# Altium footprint library PcbLib.PcbLib: 162 footprints (part 1 of 11)
Each footprint in its own frame and in the unit in brackets; x right, y up, seen from the top. Pads: shape width x height; smd on the part's side, far side on the other; paste and mask are expansions set on the pad; w line width, h text height; cw(c..) or ccw(c..) is an arc to the next point about the centre after c.
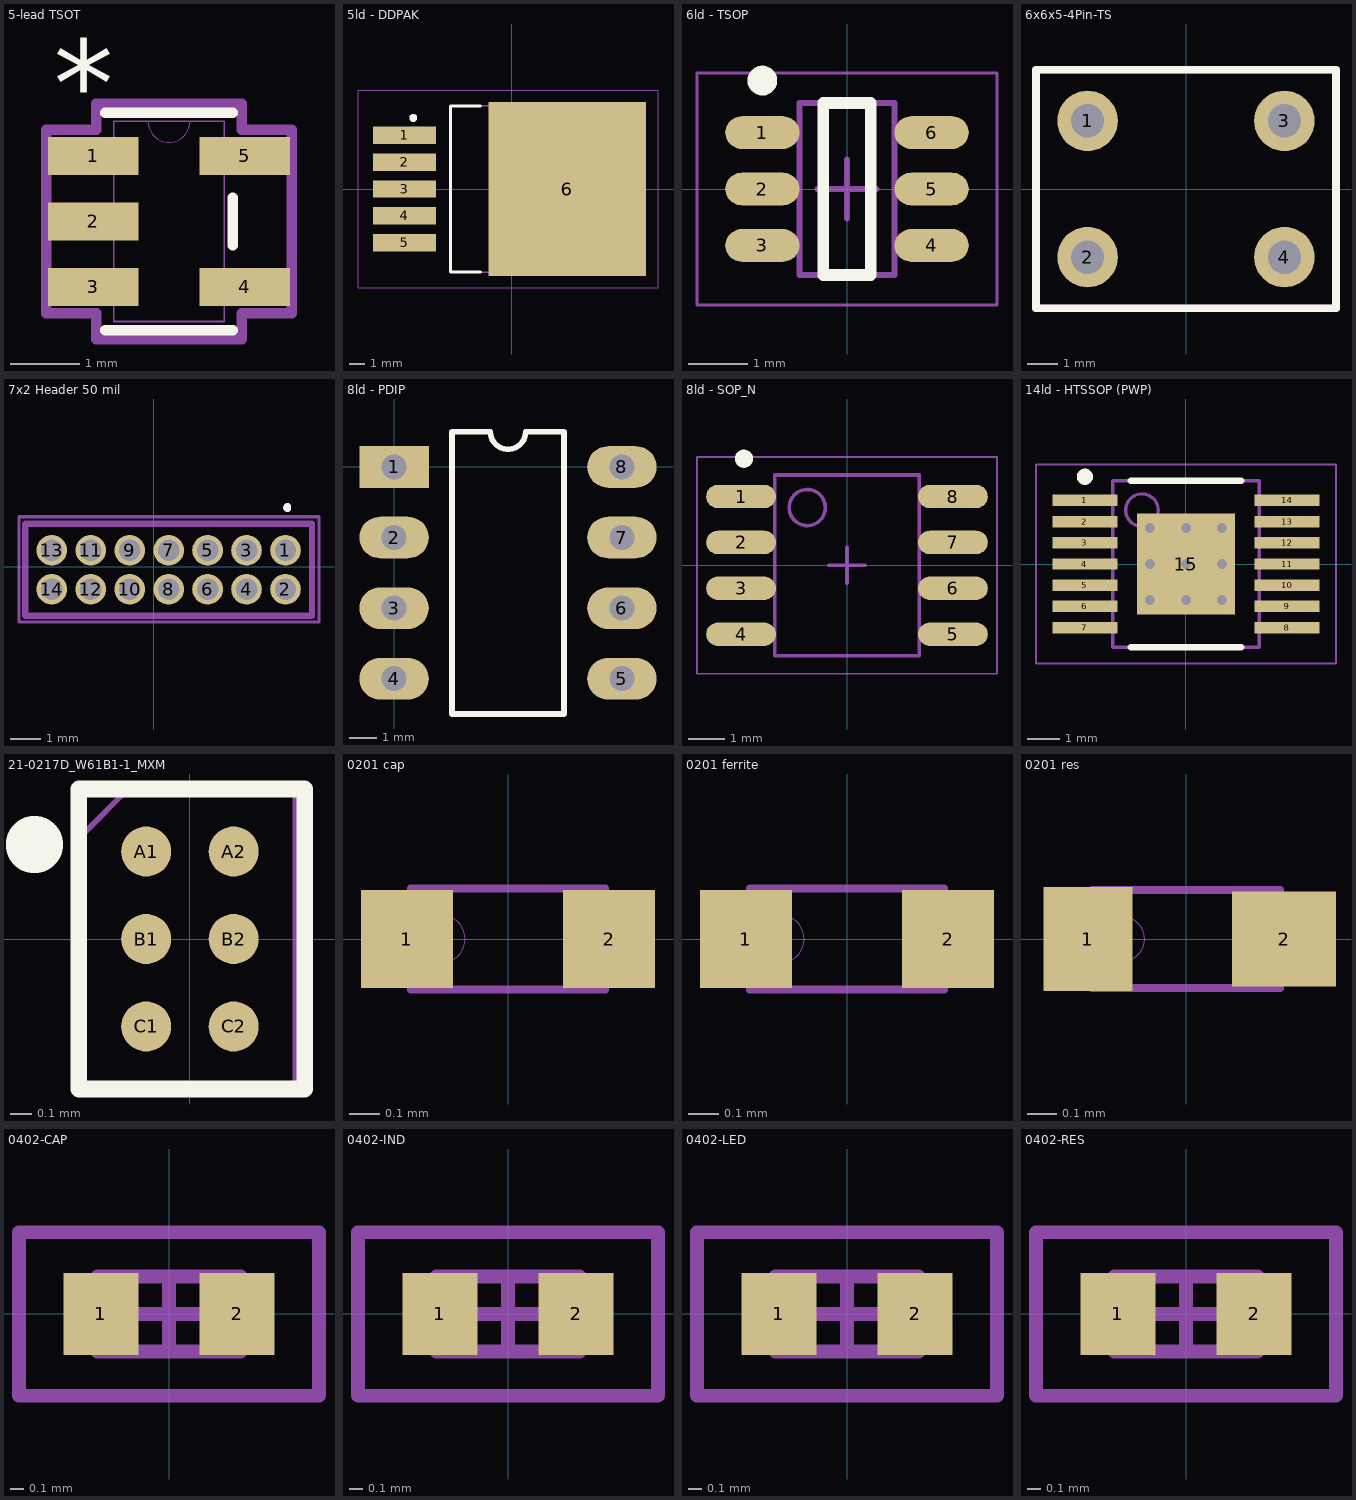
[diagram p0: the footprints below, top view; thin cyan lines are the x and y axes]

## 5-lead TSOT [mm] "LDO ADJ"
pads (5):
  rect 1.311x0.551 smd paste+0 mask+0: 1(2.71,-98.872) 2(2.71,-99.822) 3(2.71,-100.772) 4(4.91,-100.772) 5(4.91,-98.872)
Top Overlay:
  lines w0.152: 2.883,-101.399 4.737,-101.399 ; 2.883,-98.245 4.737,-98.245 ; 4.737,-100.164 4.737,-99.48
  text "*" at 2.138,-98.448 h1.27
Mechanical 13:
  lines w0: 3.505,-98.372 ccw(c3.81,-98.372) 4.115,-98.372
  lines w0.025: 2.41,-101.022 3.01,-101.022 3.01,-100.522 2.41,-100.522 2.41,-101.022 ; 2.41,-100.072 3.01,-100.072 3.01,-99.572 2.41,-99.572 2.41,-100.072 ; 2.41,-99.122 3.01,-99.122 3.01,-98.622 2.41,-98.622 2.41,-99.122 ; 3.01,-101.272 3.01,-98.372 4.61,-98.372 4.61,-101.272 3.01,-101.272 ; 4.61,-101.022 5.21,-101.022 5.21,-100.522 4.61,-100.522 4.61,-101.022 ; 4.61,-99.122 5.21,-99.122 5.21,-98.622 4.61,-98.622 4.61,-99.122
  text "*" at 2.946,-99.413 h1.27
Mechanical 15:
  lines w0.152: 2.029,-101.153 2.029,-98.491 2.756,-98.491 2.756,-98.118 4.864,-98.118 4.864,-98.491 5.591,-98.491 5.591,-101.153 4.864,-101.153 4.864,-101.526 2.756,-101.526 2.756,-101.153 2.029,-101.153
3D body "UJ_5.step": height 1, standoff 0, extent 2.41,-101.272 5.21,-98.372
3D body: height 0.25, standoff 0, extent 3.81,-99.822 4.064,-99.568

## 5ld - DDPAK [mm] "D2-PAK, 6-Pads, Body 7.80x8.63mm (max), IPC Low Density"
height 4.58
pads (6):
  rect 4x1.1 smd: 1(-6.8,3.4) 2(-6.8,1.7) 3(-6.8,0) 4(-6.8,-1.7) 5(-6.8,-3.4)
  rect 10x11 smd: 6(3.5,0)
Top Overlay:
  circle w0.25: c-6.25,4.5 r0.125
  lines w0.2: -2,-5.25 -3.9,-5.25 -3.9,5.25 -2,5.25
Mechanical 13:
  lines w0.1: -3.9,-5.275 -3.9,5.275 5.5,5.275 5.5,-5.275 -3.9,-5.275
Mechanical 15:
  lines w0.05: -9.75,-6.25 -9.75,6.25 9.25,6.25 9.25,-6.25 -9.75,-6.25
  lines w0.1: -0.5,0 0.5,0 ; 0,-0.5 0,0.5
3D body "User Library-LTC DD-PAK.STEP": height 4.48, standoff 0, extent -7.232,-5.112 7.119,5.112

## 6ld - TSOP [mm] "TSOP, 6-Leads, Body 2.90x1.60mm, Pitch 0.95mm, IPC Low Density"
height 1
pads (6):
  oval 1.25x0.55 smd: 1(-1.425,0.95) 2(-1.425,0) 3(-1.425,-0.95) 4(1.425,-0.95) 5(1.425,0) 6(1.425,0.95)
Top Overlay:
  circle w0.25: c-1.425,1.825 r0.125
  lines w0.2: -0.4,-1.45 0.4,-1.45 0.4,1.45 -0.4,1.45 -0.4,-1.45
Mechanical 13:
  lines w0.1: -0.8,-1.45 0.8,-1.45 0.8,1.45 -0.8,1.45 -0.8,-1.45
Mechanical 15:
  lines w0.05: -2.525,-1.95 2.525,-1.95 2.525,1.95 -2.525,1.95 -2.525,-1.95
  lines w0.1: -0.5,0 0.5,0 ; 0,-0.5 0,0.5
3D body "6ld - TSOP.step": height 1, standoff 0, extent -1.4,-1.45 1.4,1.45

## 6x6x5-4Pin-TS [mm] "6mm x 6mm x 5mm, 4-Pin, On Board, Tactile Switch"
height 5
pads (4):
  round 2 hole 1.1: 1(-3.25,2.25) 2(-3.25,-2.25) 3(3.25,2.25) 4(3.25,-2.25)
Top Overlay:
  lines w0.254: -4.953,-3.937 -4.953,3.937 4.953,3.937 4.953,-3.937 -4.953,-3.937
Mechanical 29:
  lines w0.254: -4.953,-3.937 4.953,-3.937 4.953,3.937 -4.953,3.937 -4.953,-3.937
3D body "User Library-Tactile switch 6x6x5mm.STEP": height 5.01, standoff -3.51, extent -3.871,-3.015 3.872,3.015

## 7x2 Header 50 mil [mm]
pads (14):
  round 1 hole 0.7: 1(4.293,0.533) 2(4.293,-0.737) 3(3.023,0.533) 4(3.023,-0.737) 5(1.753,0.533) 6(1.753,-0.737) 7(0.483,0.533) 8(0.483,-0.737) 9(-0.787,0.533) 10(-0.787,-0.737) 11(-2.057,0.533) 12(-2.057,-0.737) 13(-3.327,0.533) 14(-3.327,-0.737)
Top Overlay:
  lines w0.2: 4.369,1.876 cw(c4.369,1.926) 4.369,1.976 ; 4.369,1.876 cw(c4.369,1.926) 4.369,1.976 ; 4.369,1.876 4.369,1.976
Mechanical 13:
  lines w0.2: -4.192,-1.602 -4.192,1.398 5.158,1.398 5.158,-1.602 -4.192,-1.602
Mechanical 15:
  lines w0.1: -4.394,-1.803 -4.394,1.626 5.385,1.626 5.385,-1.803 -4.394,-1.803
3D body "HPH2-A-14-UA.STEP": height 3.81, standoff -2.49, extent -3.937,-1.824 4.953,1.626

## 8ld - PDIP [mm] "8-Lead Plastic Dual In-Line Package, Narrow Body"
height 5
pads (8):
  rect 2.5x1.5 hole 0.9: 1(0,0)
  oval 2.5x1.5 hole 0.9: 2(0,-2.54) 3(0,-5.08) 4(0,-7.62) 5(8.2,-7.62) 6(8.2,-5.08) 7(8.2,-2.54) 8(8.2,0)
Top Overlay:
  lines w0.2: 2.085,-8.89 2.085,1.27 3.465,1.27 ccw(c4.1,1.27) 4.735,1.27 6.115,1.27 6.115,-8.89 2.085,-8.89
3D body "User Library-DIP8test.STEP": height 4.57, standoff -3.81, extent 0.281,-8.765 8.101,1.145

## 8ld - SOP_N [mm] "SOP, 8-Leads, Body 4.90x3.90mm, Pitch 1.27mm, IPC Low Density"
height 1.75
pads (8):
  oval 1.929x0.65 smd: 1(-2.932,1.905) 2(-2.932,0.635) 3(-2.932,-0.635) 4(-2.932,-1.905) 5(2.932,-1.905) 6(2.932,-0.635) 7(2.932,0.635) 8(2.932,1.905)
Top Overlay:
  circle w0.25: c-2.85,2.95 r0.125
Mechanical 13:
  circle w0.1: c-1.1,1.6 r0.5
  lines w0.1: -2,-2.5 -2,2.5 2,2.5 2,-2.5 -2,-2.5
Mechanical 15:
  lines w0.05: -4.15,-3 -4.15,3 4.15,3 4.15,-3 -4.15,-3
  lines w0.1: -0.5,0 0.5,0 ; 0,-0.5 0,0.5
3D body "User Library-SOIC_N-R8.STEP": height 1.75, standoff 0, extent -3.1,-2.5 3.1,2.5

## 14ld - HTSSOP (PWP) [mm] "SSOP, 14-Leads, Body 5.00x4.40mm, Pitch 0.65mm, Thermal Pad 3.10.2x3.00.2mm, IPC Low Density"
height 1.2
pads (15):
  rect 2x0.35 smd: 1(-3.1,1.95) 2(-3.1,1.3) 3(-3.1,0.65) 4(-3.1,0) 5(-3.1,-0.65) 6(-3.1,-1.3) 7(-3.1,-1.95) 8(3.1,-1.95) 9(3.1,-1.3) 10(3.1,-0.65) 11(3.1,0) 12(3.1,0.65) 13(3.1,1.3) 14(3.1,1.95)
  rect 3x3.1 smd: 15(0,0)
via 1.1,-1.1 diameter 0.65 hole 0.3
via 0,-1.1 diameter 0.65 hole 0.3
via -1.1,-1.1 diameter 0.65 hole 0.3
via 1.1,0 diameter 0.65 hole 0.3
via 0,0 diameter 0.65 hole 0.3
via -1.1,0 diameter 0.65 hole 0.3
via 1.1,1.1 diameter 0.65 hole 0.3
via -1.1,1.1 diameter 0.65 hole 0.3
via 0,1.1 diameter 0.65 hole 0.3
Top Overlay:
  circle w0.25: c-3.1,2.675 r0.125
  lines w0.2: -1.7,-2.55 1.7,-2.55 ; -1.7,2.55 1.7,2.55
Mechanical 13:
  circle w0.1: c-1.35,1.65 r0.5
  lines w0.1: -2.25,-2.55 2.25,-2.55 2.25,2.55 -2.25,2.55 -2.25,-2.55
Mechanical 15:
  lines w0.05: -4.6,-3.05 4.6,-3.05 4.6,3.05 -4.6,3.05 -4.6,-3.05
  lines w0.1: -0.5,0 0.5,0 ; 0,-0.5 0,0.5
3D body "User Library-SSOP14P-P065.STEP": height 1.73, standoff -0.08, extent -3,-2.46 3,2.54

## 21-0217D_W61B1-1_MXM [mil]
pads (6):
  round 9 smd paste+0 mask+2: A1(-7.87,15.75) A2(7.87,15.75) B1(-7.87,0) B2(7.87,0) C1(-7.87,-15.75) C2(7.87,-15.75)
Top Overlay:
  circle w9.84: c-28,17 r0.23
  lines w3: -20,-27 20.69,-27 20.69,27 -20,27 -20,-27
Mechanical 13:
  lines w1: -19,19.13 -11.13,27 ; -19,-27 -19,27 19,27 19,-27 -19,-27
3D body "21-0217D_W61B1-1_MXM.step": height 27.09, standoff -0.01, extent -19.02,-27.01 19.02,27.01

## 0201 cap [mm]
pads (2):
  rect 0.3x0.32 smd mask+0.076: 1(-0.33,0) 2(0.33,0)
Mechanical 13:
  circle w0: c-0.216,0 r0.076
  lines w0.025: -0.318,-0.165 -0.318,0.165 ; -0.318,-0.165 -0.216,-0.165 -0.216,0.165 -0.318,0.165 ; -0.318,-0.165 0.318,-0.165 ; -0.318,-0.165 -0.318,0.165 ; -0.318,0.165 0.318,0.165 ; 0.318,-0.165 0.216,-0.165 0.216,0.165 0.318,0.165 ; 0.318,-0.165 0.318,0.165 ; 0.318,-0.165 0.318,0.165
3D body "CAP_0603_TDK.step": height 0.33, standoff 0, extent -0.318,-0.165 0.318,0.165

## 0201 ferrite [mm]
pads (2):
  rect 0.3x0.32 smd mask+0.076: 1(-0.33,0) 2(0.33,0)
Mechanical 13:
  circle w0: c-0.216,0 r0.076
  lines w0.025: -0.318,-0.165 -0.318,0.165 ; -0.318,-0.165 0.318,-0.165 ; -0.318,-0.165 -0.216,-0.165 -0.216,0.165 -0.318,0.165 ; -0.318,-0.165 -0.318,0.165 ; -0.318,0.165 0.318,0.165 ; 0.318,-0.165 0.318,0.165 ; 0.318,-0.165 0.318,0.165 ; 0.318,-0.165 0.216,-0.165 0.216,0.165 0.318,0.165
3D body "CAP_0603_TDK.step": height 0.33, standoff 0, extent -0.318,-0.165 0.318,0.165

## 0201 res [mm]
pads (2):
  rect 0.3x0.35 smd: 1(-0.33,0)
  rect 0.35x0.32 smd: 2(0.33,0)
Mechanical 13:
  circle w0: c-0.216,0 r0.076
  lines w0.025: -0.318,-0.165 -0.318,0.165 ; -0.318,-0.165 -0.216,-0.165 -0.216,0.165 -0.318,0.165 ; -0.318,-0.165 0.318,-0.165 ; -0.318,-0.165 -0.318,0.165 ; -0.318,0.165 0.318,0.165 ; 0.318,-0.165 0.216,-0.165 0.216,0.165 0.318,0.165 ; 0.318,-0.165 0.318,0.165 ; 0.318,-0.165 0.318,0.165
3D body "CAP_0603_TDK.step": height 0.33, standoff 0, extent -0.318,-0.165 0.318,0.165

## 0402-CAP [mm] "Chip Capacitor, 2-Leads, Body 1.00x0.50mm, IPC Low Density"
height 0.7
pads (2):
  rect 0.55x0.6 smd mask+0.076: 1(-0.5,0) 2(0.5,0)
Mechanical 13:
  lines w0.1: -0.525,-0.275 -0.525,0.275 0.525,0.275 0.525,-0.275 -0.525,-0.275
Mechanical 15:
  lines w0.05: -1.1,-0.6 -1.1,0.6 1.1,0.6 1.1,-0.6 -1.1,-0.6
  lines w0.1: -0.275,0 0.275,0 ; 0,-0.275 0,0.275
Mechanical 29:
  lines w0.1: -1.1,-0.6 -1.1,0.6 1.1,0.6 1.1,-0.6 -1.1,-0.6
3D body "User Library-SMD Ceramic Capacitors_0402 (1005)_BB.STEP": height 0.5, standoff 0, extent -0.512,-0.254 0.512,0.246

## 0402-IND [mm] "Chip Inductor, 2-Leads, Body 1.00x0.50mm, IPC Low Density"
height 0.6
pads (2):
  rect 0.55x0.6 smd mask+0.076: 1(-0.5,0) 2(0.5,0)
Mechanical 13:
  lines w0.1: -0.525,-0.275 0.525,-0.275 0.525,0.275 -0.525,0.275 -0.525,-0.275
Mechanical 15:
  lines w0.05: -1.1,-0.6 1.1,-0.6 1.1,0.6 -1.1,0.6 -1.1,-0.6
  lines w0.1: -0.275,0 0.275,0 ; 0,-0.275 0,0.275
Mechanical 29:
  lines w0.1: -1.1,-0.6 1.1,-0.6 1.1,0.6 -1.1,0.6 -1.1,-0.6
3D body "SW3dPS-d0402h025.STEP": height 0.25, standoff 0, extent -0.5,-0.25 0.5,0.25

## 0402-LED [mm]
pads (2):
  rect 0.55x0.6 smd mask+0.076: 1(-0.5,0) 2(0.5,0)
Mechanical 13:
  lines w0.1: -0.525,-0.275 -0.525,0.275 0.525,0.275 0.525,-0.275 -0.525,-0.275
Mechanical 15:
  lines w0.05: -1.1,-0.6 -1.1,0.6 1.1,0.6 1.1,-0.6 -1.1,-0.6
  lines w0.1: -0.275,0 0.275,0 ; 0,-0.275 0,0.275
Mechanical 29:
  lines w0.1: -1.1,-0.6 -1.1,0.6 1.1,0.6 1.1,-0.6 -1.1,-0.6
3D body "LED_SMD_1XP5_KNB.step": height 0.51, standoff 0, extent -0.47,-0.254 0.52,0.254

## 0402-RES [mm]
pads (2):
  rect 0.55x0.6 smd mask+0.076: 1(-0.5,0) 2(0.5,0)
Mechanical 13:
  lines w0.1: -0.525,-0.275 0.525,-0.275 0.525,0.275 -0.525,0.275 -0.525,-0.275
Mechanical 15:
  lines w0.05: -1.1,-0.6 1.1,-0.6 1.1,0.6 -1.1,0.6 -1.1,-0.6
  lines w0.1: -0.275,0 0.275,0 ; 0,-0.275 0,0.275
Mechanical 29:
  lines w0.1: -1.1,-0.6 1.1,-0.6 1.1,0.6 -1.1,0.6 -1.1,-0.6
3D body "User Library-0402R.STEP": height 0.34, standoff 0, extent -0.52,-0.3 0.52,0.3